# Altium footprint library LimeMicroAltiumLib.PcbLib: 876 footprints (part 30 of 57)
Each footprint in its own frame and in the unit in brackets; x right, y up, seen from the top. Pads: shape width x height; smd on the part's side, far side on the other; paste and mask are expansions set on the pad; w line width, h text height; cw(c..) or ccw(c..) is an arc to the next point about the centre after c.
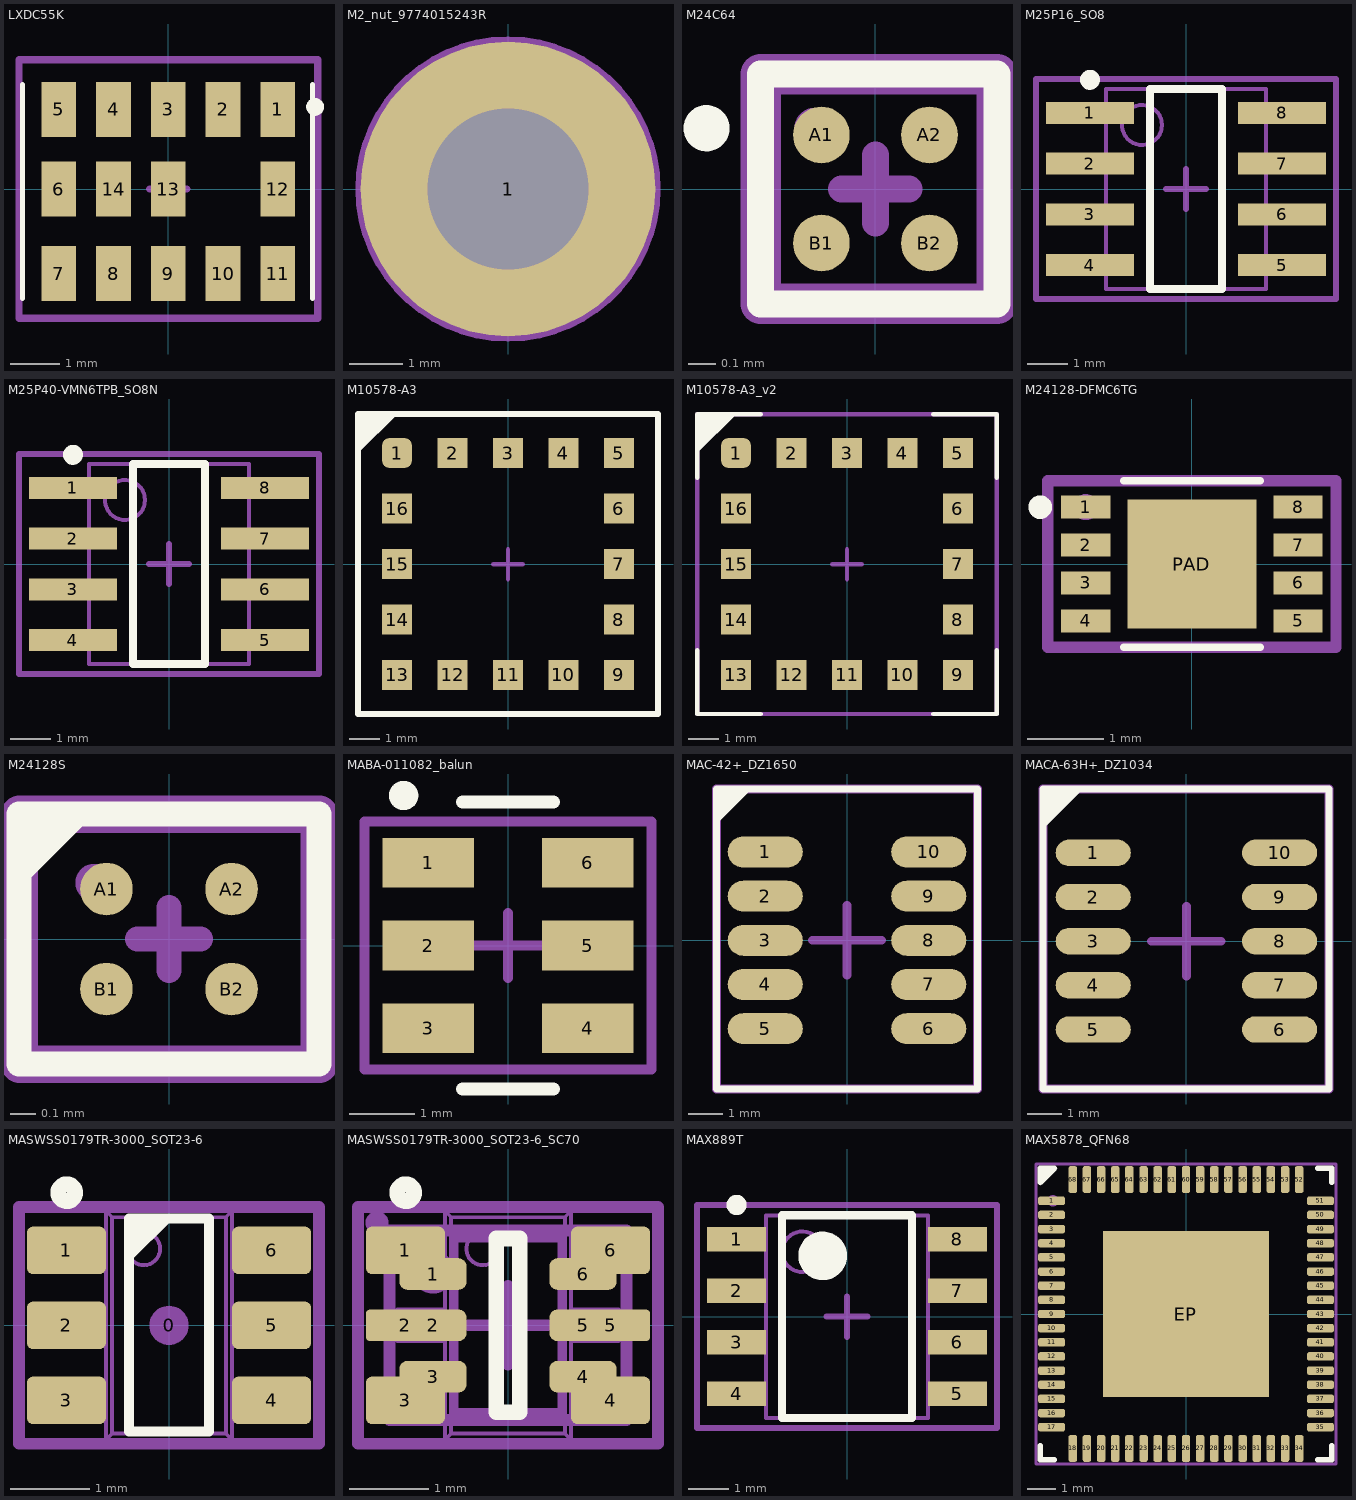
[diagram p29: the footprints below, top view; thin cyan lines are the x and y axes]

## LXDC55K [mm] "LXDC55K"
pads (14):
  rect 0.7x1.1 smd mask+0.05: 1(2.2,1.6) 2(1.1,1.6) 3(0,1.6) 4(-1.1,1.6) 5(-2.2,1.6) 6(-2.2,0) 7(-2.2,-1.7) 8(-1.1,-1.7) 9(0,-1.7) 10(1.1,-1.7) 11(2.2,-1.7) 12(2.2,0) 13(0,0) 14(-1.1,0)
Top Overlay:
  circle w0.2: c2.95,1.65 r0.079
  lines w0.1: -2.925,-2.2 -2.925,2.1 ; 2.9,-2.2 2.9,2.1
Mechanical 15:
  circle w0.2: c2.2,1.625 r0.079
  lines w0.15: -0.375,0 0,0 ; 0,-0.375 0,0 ; 0,0.375 0,0 ; 0.375,0 0,0 ; -3,-2.6 3,-2.6 3,2.6 -3,2.6 -3,-2.6
  text ".Designator" at 0,0 h0.55
3D body: height 2.1, standoff 0, extent -2.85,-2.5 2.85,2.5

## M2_nut_9774015243R [mm]
pads (1):
  round 5.5 hole 3 unplated mask+0.05: 1(0,0)
Top Paste:
  region: 0,0 0,2.8 -0.184,2.8 -0.547,2.752 -0.902,2.657 -1.241,2.517 -1.559,2.333 -1.85,2.11 -2.11,1.85 -2.333,1.559 -2.517,1.241 -2.657,0.902 -2.752,0.547 -2.8,0.184 -2.8,0
  region: 0,0 0,2.8 0.184,2.8 0.547,2.752 0.902,2.657 1.241,2.517 1.559,2.333 1.85,2.11 2.11,1.85 2.333,1.559 2.517,1.241 2.657,0.902 2.752,0.547 2.8,0.184 2.8,0
  region: 0,0 0,-2.8 0.184,-2.8 0.547,-2.752 0.902,-2.657 1.241,-2.517 1.559,-2.333 1.85,-2.11 2.11,-1.85 2.333,-1.559 2.517,-1.241 2.657,-0.902 2.752,-0.547 2.8,-0.184 2.8,0
  region: 0,0 0,-2.8 -0.184,-2.8 -0.547,-2.752 -0.902,-2.657 -1.241,-2.517 -1.559,-2.333 -1.85,-2.11 -2.11,-1.85 -2.333,-1.559 -2.517,-1.241 -2.657,-0.902 -2.752,-0.547 -2.8,-0.184 -2.8,0
Mechanical 15:
  circle w0.2: c0,0 r2.75
  lines w0.2: -0.8,0 0,0 ; 0,-0.8 0,0 ; 0,0.8 0,0 ; 0.8,0 0,0
  text ".Designator" at 0,0 h0.55
3D body "9774015243R (rev1).stp": height 1.6, standoff -1.3, extent -2.175,-2.272 2.175,2.072

## M24C64 [mm]
pads (4):
  round 0.21 smd mask+0.05: A1(-0.2,0.2) A2(0.2,0.2) B1(-0.2,-0.2) B2(0.2,-0.2)
Top Overlay:
  circle w0.1: c-0.625,0.225 r0.035
  lines w0.1: -0.425,-0.425 0.45,-0.425 0.45,0.425 -0.425,0.425 -0.425,-0.425
Mechanical 15:
  circle w0.1: c-0.225,0.225 r0.025
  lines w0.1: -0.125,0 0,0 ; 0,-0.125 0,0 ; 0,0.125 0,0 ; 0.125,0 0,0
  lines w0.15: -0.425,-0.425 0.45,-0.425 0.45,0.425 -0.425,0.425 -0.425,-0.425
  text ".Designator" at 0,0 h0.55
3D body: height 0.32, standoff 0, extent -0.412,-0.35 0.413,0.35
3D body: height 0.33, standoff 0.32, extent -0.25,0.15 -0.15,0.25

## M25P16_SO8 [mm] "SOIC, 8-Leads, Body 4,90x3,90mm, Pitch 1,27mm, IPC Medium Density"
height 1.7
pads (8):
  rect 2.2x0.55 smd: 1(-2.4,1.905) 2(-2.4,0.635) 3(-2.4,-0.635) 4(-2.4,-1.905) 5(2.4,-1.905) 6(2.4,-0.635) 7(2.4,0.635) 8(2.4,1.905)
Top Overlay:
  circle w0.25: c-2.4,2.73 r0.125
  lines w0.2: -0.9,-2.5 0.9,-2.5 0.9,2.5 -0.9,2.5 -0.9,-2.5
Mechanical 13:
  circle w0.1: c-1.1,1.6 r0.5
  lines w0.1: -2,-2.5 2,-2.5 2,2.5 -2,2.5 -2,-2.5
Mechanical 15:
  circle w0.2: c-2.5,1.9 r0.1
  lines w0.15: -0.5,0 0.5,0 ; 0,-0.5 0,0.5 ; -3.75,-2.75 3.75,-2.75 3.75,2.75 -3.75,2.75 -3.75,-2.75
  text ".Designator" at 0,0 h0.55
3D body "CircuitWorks-SO-8.step": height 1.45, standoff 0, extent -2.889,-2.45 2.889,2.452

## M25P40-VMN6TPB_SO8N [mm] "SOIC, 8-Leads, Body 4,90x3,90mm, Pitch 1,27mm, IPC Medium Density"
height 1.7
pads (8):
  rect 2.2x0.55 smd: 1(-2.4,1.905) 2(-2.4,0.635) 3(-2.4,-0.635) 4(-2.4,-1.905) 5(2.4,-1.905) 6(2.4,-0.635) 7(2.4,0.635) 8(2.4,1.905)
Top Overlay:
  circle w0.25: c-2.4,2.73 r0.125
  lines w0.2: -0.9,-2.5 0.9,-2.5 0.9,2.5 -0.9,2.5 -0.9,-2.5
Mechanical 13:
  circle w0.1: c-1.1,1.6 r0.5
  lines w0.1: -2,-2.5 2,-2.5 2,2.5 -2,2.5 -2,-2.5
Mechanical 15:
  circle w0.2: c-2.5,1.9 r0.1
  lines w0.15: -0.5,0 0.5,0 ; 0,-0.5 0,0.5 ; -3.75,-2.75 3.75,-2.75 3.75,2.75 -3.75,2.75 -3.75,-2.75
  text ".Designator" at 0,0 h0.55
3D body "CircuitWorks-SO-8.step": height 1.45, standoff 0, extent -2.889,-2.45 2.889,2.452

## M10578-A3 [mm] "RADIONOVA® RF Receiver GPS 1.575GHz -165dBm Module"
pads (16):
  rrect50% 1x1 smd mask+0.05: 1(-3.7,3.7)
  rect 1x1 smd mask+0.05: 2(-1.85,3.7) 3(0,3.7) 4(1.85,3.7) 5(3.7,3.7) 6(3.7,1.85) 7(3.7,0) 8(3.7,-1.85) 9(3.7,-3.7) 10(1.85,-3.7) 11(0,-3.7) 12(-1.85,-3.7) 13(-3.7,-3.7) 14(-3.7,-1.85) 15(-3.7,0) 16(-3.7,1.85)
Top Overlay:
  region: -5,5 -5,3.7 -3.7,5
  lines w0.2: -5,-5 -5,5 5,5 5,-5 -5,-5
Mechanical 15:
  circle w0.25: c-3.5,3.5 r0.1
  lines w0.15: -0.5,0 0.5,0 ; 0,-0.5 0,0.5 ; -5,-5 5,-5 5,5 -5,5 -5,-5
  text ".Designator" at 0,0 h0.55
3D body "M10578.STEP": height 1.3, standoff -0.52, extent -4.5,-4.5 4.5,4.5

## M10578-A3_v2 [mm] "RADIONOVA® RF Receiver GPS 1.575GHz -165dBm Module"
pads (16):
  rrect50% 1x1 smd mask+0.05: 1(-3.7,3.7)
  rect 1x1 smd mask+0.05: 2(-1.85,3.7) 3(0,3.7) 4(1.85,3.7) 5(3.7,3.7) 6(3.7,1.85) 7(3.7,0) 8(3.7,-1.85) 9(3.7,-3.7) 10(1.85,-3.7) 11(0,-3.7) 12(-1.85,-3.7) 13(-3.7,-3.7) 14(-3.7,-1.85) 15(-3.7,0) 16(-3.7,1.85)
Top Overlay:
  region: -5,5 -5,3.7 -3.7,5
  lines w0.15: -5,-2.875 -5,-5 -2.875,-5 ; -5,2.875 -5,5 -2.875,5 ; 2.875,-5 5,-5 5,-2.875 ; 2.875,5 5,5 5,2.875
Mechanical 15:
  circle w0.25: c-3.5,3.5 r0.1
  lines w0.15: -0.5,0 0.5,0 ; 0,-0.5 0,0.5 ; -5,-5 -5,5 5,5 5,-5 -5,-5
  text ".Designator" at 0,0 h0.55
3D body "M10578.STEP": height 1.3, standoff -0.52, extent -4.5,-4.5 4.5,4.5

## M24128-DFMC6TG [mm] "8-UFDFPN (2x3)"
pads (9):
  rect 0.65x0.3 smd mask+0.045: 1(-1.4,0.75) 2(-1.4,0.25) 3(-1.4,-0.25) 4(-1.4,-0.75) 5(1.4,-0.75) 6(1.4,-0.25) 7(1.4,0.25) 8(1.4,0.75)
  rect 1.7x1.7 smd mask+0.05: PAD(0,0)
Top Overlay:
  circle w0.2: c-2,0.75 r0.056
  lines w0.1: -0.9,-1.1 0.9,-1.1 ; -0.9,1.1 0.9,1.1
Mechanical 15:
  circle w0.2: c-1.4,0.75 r0.071
  lines w0.15: -0.3,0 0,0 ; 0,-0.3 0,0 ; 0,0.3 0,0 ; 0.3,0 0,0 ; -1.9,-1.1 1.9,-1.1 1.9,1.1 -1.9,1.1 -1.9,-1.1
  text ".Designator" at 0,0 h0.55
3D body "User Library-DFN-8-2.step": height 0.9, standoff 0, extent -1.523,-1.006 1.517,0.994

## M24128S [mm]
pads (4):
  round 0.21 smd mask+0.05: A1(-0.25,0.2) A2(0.25,0.2) B1(-0.25,-0.2) B2(0.25,-0.2)
Top Overlay:
  region: -0.6,0.2 -0.3,0.5 -0.6,0.5
  lines w0.1: -0.6,-0.5 0.6,-0.5 0.6,0.5 -0.6,0.5 -0.6,-0.5
Mechanical 15:
  circle w0.1: c-0.3,0.225 r0.025
  lines w0.1: -0.125,0 0,0 ; 0,-0.125 0,0 ; 0,0.125 0,0 ; 0.125,0 0,0
  lines w0.15: -0.6,-0.5 -0.6,0.5 0.6,0.5 0.6,-0.5 -0.6,-0.5
  text ".Designator" at 0,0 h0.55
3D body: height 0.32, standoff 0, extent -0.412,-0.35 0.413,0.35
3D body: height 0.33, standoff 0.32, extent -0.25,0.15 -0.15,0.25

## MABA-011082_balun [mm]
pads (6):
  rect 1.4x0.76 smd mask+0.05: 1(-1.225,1.27) 2(-1.225,0) 3(-1.225,-1.27) 4(1.225,-1.27) 5(1.225,0) 6(1.225,1.27)
Top Overlay:
  circle w0.25: c-1.6,2.3 r0.1
  lines w0.2: -0.7,-2.2 0.7,-2.2 ; -0.7,2.2 0.7,2.2
Mechanical 15:
  circle w0.25: c-1.6,1.3 r0.1
  lines w0.15: -0.5,0 0.5,0 ; 0,-0.5 0,0.5 ; -2.2,-1.9 2.2,-1.9 2.2,1.9 -2.2,1.9 -2.2,-1.9
  text ".Designator" at 0,0 h0.55
3D body "Coilcraft-JA4220-AL.step": height 3.03, standoff -0.02, extent -2.095,-2.225 2.095,2.225

## MAC-42+_DZ1650 [mm]
pads (10):
  oval 2.16x0.89 smd mask+0.05: 1(-2.35,2.54) 2(-2.35,1.27) 3(-2.35,0) 4(-2.35,-1.27) 5(-2.35,-2.54) 6(2.35,-2.54) 7(2.35,-1.27) 8(2.35,0) 9(2.35,1.27) 10(2.35,2.54)
Top Overlay:
  region: -2.75,4.35 -3.7,3.4 -3.7,4.35
  lines w0.2: -3.75,-4.275 -3.75,4.35 3.75,4.35 3.75,-4.275 -3.75,-4.275
Mechanical 15:
  circle w0.254: c-2.5,2.5 r0.125
  lines w0.254: -1,0 0,0 ; 0,-1 0,0 ; 0,1 0,0 ; 1,0 0,0 ; -3.75,-4.275 3.75,-4.275 3.75,4.35 -3.75,4.35 -3.75,-4.275
  text ".Designator" at 0,0 h0.55
3D body: height 1.53, standoff 0, extent -2.698,2.301 -2.3,2.7
3D body: height 1.52, standoff 0, extent -3.175,-3.9 3.175,3.9

## MACA-63H+_DZ1034 [mm]
pads (10):
  oval 2.16x0.76 smd mask+0.05: 1(-2.68,2.54) 2(-2.68,1.27) 3(-2.68,0) 4(-2.68,-1.27) 5(-2.68,-2.54) 6(2.68,-2.54) 7(2.68,-1.27) 8(2.68,0) 9(2.68,1.27) 10(2.68,2.54)
Top Overlay:
  region: -3.025,4.325 -4.125,3.225 -4.125,4.325
  lines w0.2: -4.125,-4.25 -4.125,4.375 4.1,4.375 4.1,-4.25 -4.125,-4.25
Mechanical 15:
  circle w0.254: c-2.5,2.5 r0.125
  lines w0.254: -1,0 0,0 ; 0,-1 0,0 ; 0,1 0,0 ; 1,0 0,0 ; -4.125,-4.25 4.1,-4.25 4.1,4.375 -4.125,4.375 -4.125,-4.25
  text ".Designator" at 0,0 h0.55
3D body: height 2.67, standoff 0, extent -3.175,-3.81 3.175,3.81
3D body: height 2.68, standoff 0, extent -2.698,2.301 -2.3,2.7

## MASWSS0179TR-3000_SOT23-6 [mm]
height 1.6
pads (7):
  round 0.5 on Mech15: 0(0,0)
  rrect25% 1x0.6 smd: 1(-1.3,0.95) 2(-1.3,0) 3(-1.3,-0.95) 4(1.3,-0.95) 5(1.3,0) 6(1.3,0.95)
Top Overlay:
  circle w0.2: c-1.295,1.68 r0.107
  region: -0.508,1.353 0.053,1.353 -0.508,0.792
  lines w0.127: -0.508,-1.347 0.508,-1.347 0.508,1.353 -0.508,1.353 -0.508,-1.347
Mechanical 13:
  circle w0.05: c-0.32,0.97 r0.208
  lines w0.05: -1.191,-1.15 -1.191,-0.75 ; -1.191,-0.2 -1.191,0.2 ; -1.191,0.75 -1.191,1.15 ; -1.1,-1.15 -1.1,-0.75 ; -1.1,-0.2 -1.1,0.2 ; -1.1,0.75 -1.1,1.15 ; -1.094,-1.15 -1.094,-0.75 ; -1.094,-0.2 -1.094,0.2 ; -1.094,0.75 -1.094,1.15 ; -0.844,-1.15 -0.844,-0.75 ; -0.844,-0.2 -0.844,0.2 ; -0.844,0.75 -0.844,1.15 ; -0.8,-1.15 -1.4,-1.15 -1.4,-0.75 -0.8,-0.75 ; -0.8,-0.2 -1.4,-0.2 -1.4,0.2 -0.8,0.2 ; -0.8,0.75 -1.4,0.75 -1.4,1.15 -0.8,1.15 ; 0.8,-1.15 1.4,-1.15 1.4,-0.75 0.8,-0.75 ; 0.8,-0.2 1.4,-0.2 1.4,0.2 0.8,0.2 ; 0.8,0.75 1.4,0.75 1.4,1.15 0.8,1.15 ; 0.844,-1.15 0.844,-0.75 ; 0.844,-0.2 0.844,0.2 ; 0.844,0.75 0.844,1.15 ; 1.094,-1.15 1.094,-0.75 ; 1.094,-0.2 1.094,0.2 ; 1.094,0.75 1.094,1.15 ; 1.1,-1.15 1.1,-0.75 ; 1.1,-0.2 1.1,0.2 ; 1.1,0.75 1.1,1.15 ; 1.191,-1.15 1.191,-0.75 ; 1.191,-0.2 1.191,0.2 ; 1.191,0.75 1.191,1.15 ; -0.8,-1.45 -0.8,1.45 ; -0.8,-1.45 -0.719,-1.369 ; -0.8,-1.45 0.8,-1.45 ; -0.8,1.45 -0.719,1.369 ; -0.8,1.45 0.8,1.45 ; -0.719,-1.369 0.719,-1.369 ; -0.719,-1.369 -0.719,1.369 ; -0.719,1.369 0.719,1.369 ; 0.719,-1.369 0.8,-1.45 ; 0.719,-1.369 0.719,1.369 ; 0.719,1.369 0.8,1.45 ; 0.8,-1.45 0.8,1.45
Mechanical 15:
  circle w0.15: c-1.325,0.95 r0.071
  lines w0.15: -1.9,-1.5 1.9,-1.5 1.9,1.5 -1.9,1.5 -1.9,-1.5
  text ".Designator" at 0,0 h0.55
3D body "SOT23-6.STEP": height 1.44, standoff -0.01, extent -1.4,-1.45 1.4,1.45

## MASWSS0179TR-3000_SOT23-6_SC70 [mm]
height 1.6
pads (12):
  rrect25% 1x0.6 smd mask+0.05: 1(-1.3,0.95) 3(-1.3,-0.95) 4(1.3,-0.95) 6(1.3,0.95)
  rrect50% 0.85x0.4 smd mask+0.05: 1(-0.95,0.65) 2(-0.95,0) 3(-0.95,-0.65) 4(0.95,-0.65) 5(0.95,0) 6(0.95,0.65)
  rrect25% 1x0.4 smd mask+0.05: 2(-1.3,0) 5(1.3,0)
Top Overlay:
  circle w0.2: c-1.295,1.68 r0.107
  lines w0.2: -0.15,-1.1 -0.15,1.1 0.15,1.1 0.15,-1.1 -0.15,-1.1
Mechanical 13:
  circle w0.05: c-0.32,0.97 r0.208
  lines w0.05: -1.191,-1.15 -1.191,-0.75 ; -1.191,-0.2 -1.191,0.2 ; -1.191,0.75 -1.191,1.15 ; -1.1,-1.15 -1.1,-0.75 ; -1.1,-0.2 -1.1,0.2 ; -1.1,0.75 -1.1,1.15 ; -1.094,-1.15 -1.094,-0.75 ; -1.094,-0.2 -1.094,0.2 ; -1.094,0.75 -1.094,1.15 ; -0.844,-1.15 -0.844,-0.75 ; -0.844,-0.2 -0.844,0.2 ; -0.844,0.75 -0.844,1.15 ; -0.8,-1.15 -1.4,-1.15 -1.4,-0.75 -0.8,-0.75 ; -0.8,-0.2 -1.4,-0.2 -1.4,0.2 -0.8,0.2 ; -0.8,0.75 -1.4,0.75 -1.4,1.15 -0.8,1.15 ; 0.8,-1.15 1.4,-1.15 1.4,-0.75 0.8,-0.75 ; 0.8,-0.2 1.4,-0.2 1.4,0.2 0.8,0.2 ; 0.8,0.75 1.4,0.75 1.4,1.15 0.8,1.15 ; 0.844,-1.15 0.844,-0.75 ; 0.844,-0.2 0.844,0.2 ; 0.844,0.75 0.844,1.15 ; 1.094,-1.15 1.094,-0.75 ; 1.094,-0.2 1.094,0.2 ; 1.094,0.75 1.094,1.15 ; 1.1,-1.15 1.1,-0.75 ; 1.1,-0.2 1.1,0.2 ; 1.1,0.75 1.1,1.15 ; 1.191,-1.15 1.191,-0.75 ; 1.191,-0.2 1.191,0.2 ; 1.191,0.75 1.191,1.15 ; -0.8,-1.45 0.8,-1.45 ; -0.8,-1.45 -0.719,-1.369 ; -0.8,-1.45 -0.8,1.45 ; -0.8,1.45 0.8,1.45 ; -0.8,1.45 -0.719,1.369 ; -0.719,-1.369 -0.719,1.369 ; -0.719,-1.369 0.719,-1.369 ; -0.719,1.369 0.719,1.369 ; 0.719,-1.369 0.719,1.369 ; 0.719,-1.369 0.8,-1.45 ; 0.719,1.369 0.8,1.45 ; 0.8,-1.45 0.8,1.45
  lines w0.1: -0.675,-1.1 0.675,-1.1 0.675,1.1 -0.675,1.1 -0.675,-1.1
Mechanical 15:
  circle w0.15: c-1.659,1.3 r0.071
  circle w0.4: c-0.95,0.675 r0.071
  lines w0.15: -0.5,0 0.5,0 ; 0,-0.5 0,0.5 ; -1.9,-1.5 -1.9,1.5 1.9,1.5 1.9,-1.5 -1.9,-1.5 ; -1.5,-1.2 1.5,-1.2 1.5,1.2 -1.5,1.2 -1.5,-1.2
  text ".Designator" at 0,0 h0.55
3D body "SOT23-6.STEP": height 1.44, standoff -0.01, extent -1.4,-1.45 1.4,1.45
3D body "User Library-SC70-6.step": height 0.92, standoff -0.03, extent -1.05,-1 1.05,1

## MAX889T [mm] "SOIC, 8-Leads, Body 4,90x3,90mm, Pitch 1,27mm, IPC Medium Density"
height 1.75
pads (8):
  rect 1.45x0.6 smd: 1(-2.725,1.905) 2(-2.725,0.635) 3(-2.725,-0.635) 4(-2.725,-1.905) 5(2.725,-1.905) 6(2.725,-0.635) 7(2.725,0.635) 8(2.725,1.905)
Top Overlay:
  circle w0.6: c-0.6,1.5 r0.3
  circle w0.25: c-2.725,2.755 r0.125
  lines w0.2: -1.6,-2.5 1.6,-2.5 1.6,2.5 -1.6,2.5 -1.6,-2.5
Mechanical 13:
  circle w0.1: c-1.1,1.6 r0.5
  lines w0.1: -2,-2.5 2,-2.5 2,2.5 -2,2.5 -2,-2.5
Mechanical 15:
  circle w0.25: c-2.725,1.905 r0.125
  lines w0.15: -0.5,0 0.5,0 ; 0,-0.5 0,0.5 ; -3.7,-2.75 3.7,-2.75 3.7,2.75 -3.7,2.75 -3.7,-2.75
  text ".Designator" at -0.05,0 h0.55
3D body "SOIC-8.STEP": height 1.75, standoff 0, extent -3,-2.45 3,2.45

## MAX5878_QFN68 [mm]
pads (69):
  rrect50% 0.95x0.3 smd mask+0.05: 1(-4.75,4) 2(-4.75,3.5) 3(-4.75,3) 4(-4.75,2.5) 5(-4.75,2) 6(-4.75,1.5) 7(-4.75,1) 8(-4.75,0.5) 9(-4.75,0) 10(-4.75,-0.5) 11(-4.75,-1) 12(-4.75,-1.5) 13(-4.75,-2) 14(-4.75,-2.5) 15(-4.75,-3) 16(-4.75,-3.5) 17(-4.75,-4) 35(4.75,-4) 36(4.75,-3.5) 37(4.75,-3) 38(4.75,-2.5) 39(4.75,-2) 40(4.75,-1.5) 41(4.75,-1) 42(4.75,-0.5) 43(4.75,0) 44(4.75,0.5) 45(4.75,1) 46(4.75,1.5) 47(4.75,2) 48(4.75,2.5) 49(4.75,3) 50(4.75,3.5) 51(4.75,4)
  rrect50% 0.3x0.95 smd mask+0.05: 18(-4,-4.75) 19(-3.5,-4.75) 20(-3,-4.75) 21(-2.5,-4.75) 22(-2,-4.75) 23(-1.5,-4.75) 24(-1,-4.75) 25(-0.5,-4.75) 26(0,-4.75) 27(0.5,-4.75) 28(1,-4.75) 29(1.5,-4.75) 30(2,-4.75) 31(2.5,-4.75) 32(3,-4.75) 33(3.5,-4.75) 34(4,-4.75) 52(4,4.75) 53(3.5,4.75) 54(3,4.75) 55(2.5,4.75) 56(2,4.75) 57(1.5,4.75) 58(1,4.75) 59(0.5,4.75) 60(0,4.75) 61(-0.5,4.75) 62(-1,4.75) 63(-1.5,4.75) 64(-2,4.75) 65(-2.5,4.75) 66(-3,4.75) 67(-3.5,4.75) 68(-4,4.75)
  rect 5.85x5.85 smd paste-5 mask+0.05: EP(-0.001,-0.001)
Top Overlay:
  region: -5.15,4.55 -4.55,5.15 -5.15,5.15
  lines w0.2: -5.15,-4.65 -5.15,-5.15 -4.65,-5.15 ; 4.65,-5.15 5.15,-5.15 5.15,-4.65 ; 4.65,5.15 5.15,5.15 5.15,4.65 ; -5.15,4.65 -4.65,5.15 -5.15,5.15 -5.15,4.65
Top Paste:
  region: -0.781,0.78 0.78,0.78 0.78,-0.781 -0.781,-0.781
  region: -2.773,0.78 -1.21,0.78 -1.21,-0.781 -2.773,-0.781
  region: 1.213,0.78 2.77,0.78 2.77,-0.781 1.213,-0.781
  region: 1.211,2.77 2.77,2.77 2.77,1.211 1.211,1.211
  region: -0.782,2.77 0.78,2.77 0.78,1.213 -0.782,1.213
  region: -2.774,2.77 -1.21,2.77 -1.21,1.212 -2.774,1.212
  region: -2.773,-1.21 -1.21,-1.21 -1.21,-2.773 -2.773,-2.773
  region: -0.782,-1.21 0.78,-1.21 0.78,-2.777 -0.782,-2.777
  region: 1.214,-1.21 2.77,-1.21 2.77,-2.777 1.214,-2.777
Mechanical 15:
  circle w0.2: c-4.7,4 r0.1
  lines w0.1: -5.3,-5.3 5.3,-5.3 5.3,5.3 -5.3,5.3 -5.3,-5.3
  lines w0.15: -0.9,0 0,0 ; 0,-0.9 0,0 ; 0,0.9 0,0 ; 0.9,0 0,0
  text ".Designator" at 0,0 h0.55
3D body: height 0.95, standoff 0.9, extent -4.598,4.2 -4.2,4.6
3D body: height 0.9, standoff 0, extent -5,-5 5,5